# Altium footprint library PcbLib_Source_IoT.PcbLib: 49 footprints (part 3 of 4)
Each footprint in its own frame and in the unit in brackets; x right, y up, seen from the top. Pads: shape width x height; smd on the part's side, far side on the other; paste and mask are expansions set on the pad; w line width, h text height; cw(c..) or ccw(c..) is an arc to the next point about the centre after c.
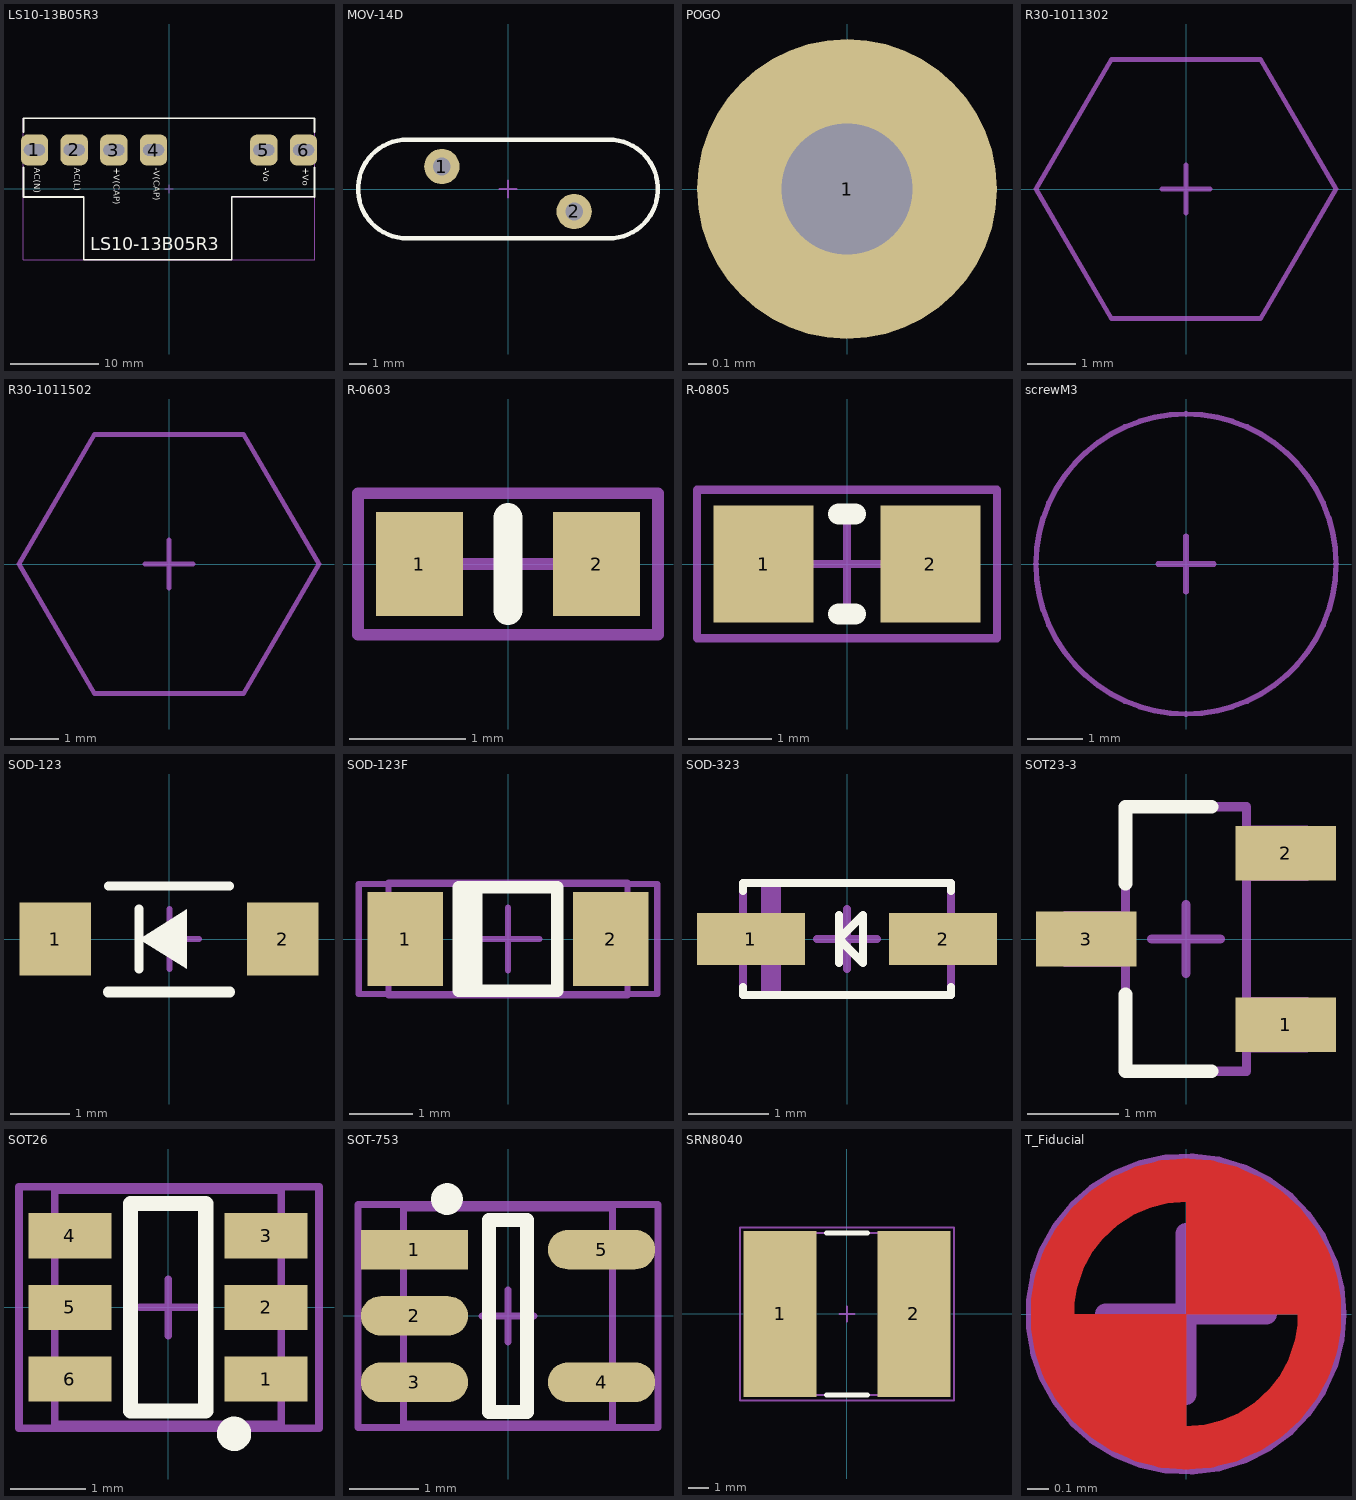
[diagram p2: the footprints below, top view; thin cyan lines are the x and y axes]

## LS10-13B05R3 [mm]
pads (6):
  rrect50% 3.1x3.5 hole 1.3 slot 2.4 at 0 deg: 1(-15.25,4.43) 2(-10.75,4.43) 3(-6.25,4.42) 4(-1.75,4.42) 5(10.75,4.42) 6(15.25,4.42)
Top Overlay:
  lines w0.2: -16.5,2.425 -16.5,-0.904 -9.662,-0.904 -9.662,-8.025 7.102,-8.025 ; -16.5,6.425 -16.5,8.025 16.5,8.025 16.5,6.425 ; 7.102,-8.007 7.102,-0.886 16.5,-0.886 ; 16.5,-0.895 16.5,2.425
  text "AC(N)" at -15.528,2.398 h1.2
  text "AC(L)" at -11.028,2.398 h1.2
  text "+V(CAP)" at -6.528,2.398 h1.2
  text "-V(CAP)" at -2.028,2.398 h1.2
  text "-Vo" at 10.372,2.398 h1.2
  text "+Vo" at 14.872,2.398 h1.2
  text "LS10-13B05R3" at -8.921,-7.473 h2.5
Mechanical:
  lines w0.1: -0.5,0 0.5,0 ; 0,-0.5 0,0.5 ; 7.102,-8.025 -9.662,-8.025 -9.662,-0.904 -16.5,-0.904 -16.5,8.025 16.5,8.025 16.5,-0.895 7.102,-0.895 7.102,-8.016
Top Assembly (Mech29):
  lines w0.1: -16.5,-8.025 16.5,-8.025 16.5,8.025 -16.5,8.025 -16.5,-8.025
  text "'.Designator'" at -11,-6.966 h2
3D body "PCB2.step": height 18.62, standoff -1.42, extent -16.081,-7.653 15.966,7.522

## MOV-14D [mm]
pads (2):
  round 2 hole 1: 1(-3.75,1.275) 2(3.75,-1.275)
Top Overlay:
  lines w0.254: -5.7,-2.8 cw(c-5.7,0) -5.7,2.8 5.7,2.8 cw(c5.7,0) 5.7,-2.8 -5.7,-2.8
Mechanical:
  lines w0.1: -0.5,0 0.5,0 ; 0,-0.5 0,0.5 ; -5.7,-2.8 cw(c-5.7,0) -5.7,2.8 5.7,2.8 cw(c5.7,0) 5.7,-2.8 -5.7,-2.8
Top Assembly (Mech29):
  lines w0.1: -5.7,-2.8 cw(c-5.7,0) -5.7,2.8 5.7,2.8 cw(c5.7,0) 5.7,-2.8 -5.7,-2.8
  text "'.Designator'" at -2.318,-0.559 h2
3D body "User Library-Varistor 14mm.step": height 20.5, standoff -2.5, extent -8.5,-2.8 8.5,2.8

## POGO [mm]
pads (1):
  round 1.6 hole 0.7: 1(0,0)
3D body "mill-max-0914-3-15-20-77-14-11-0.step": height 9.98, standoff -2.9, extent -0.914,-0.914 0.914,0.914

## R30-1011302 [mm]
Mechanical:
  lines w0.1: -0.5,0 0.5,0 ; 0,-0.5 0,0.5 ; -3.125,0 -1.55,2.7 1.55,2.7 3.125,0 1.55,-2.7 -1.55,-2.7 -3.125,0
Top Assembly (Mech29):
  lines w0.1: -3.125,0 -1.55,2.7 1.55,2.7 3.125,0 1.55,-2.7 -1.55,-2.7 -3.125,0
  text "'.Designator'" at -1.025,1.175 h1.5
3D body "r30-1011302.stp": height -1.61, standoff -14.61, extent -3.117,-2.7 3.118,2.7

## R30-1011502 [mm]
Mechanical:
  lines w0.1: -0.5,0 0.5,0 ; 0,-0.5 0,0.5 ; -3.125,0 -1.55,2.7 1.55,2.7 3.125,0 1.55,-2.7 -1.55,-2.7 -3.125,0
Top Assembly (Mech29):
  lines w0.1: -3.125,0 -1.55,2.7 1.55,2.7 3.125,0 1.55,-2.7 -1.55,-2.7 -3.125,0
  text "'.Designator'" at -1.4,-0.525 h2
3D body "r30-1011502.stp": height -1.6, standoff -16.6, extent -3.117,-2.7 3.118,2.7

## R-0603 [mm]
pads (2):
  rect 0.75x0.9 smd mask+0.1: 1(-0.765,0) 2(0.765,0)
Top Overlay:
  lines w0.254: 0,-0.4 0,0.4
Mechanical:
  lines w0.1: -0.375,0 0.375,0 ; 0,-0.375 0,0.375 ; -1.295,-0.61 -1.295,0.61 1.295,0.61 1.295,-0.61 -1.295,-0.61
Top Assembly (Mech29):
  lines w0.1: -1.295,-0.61 -1.295,0.61 1.295,0.61 1.295,-0.61 -1.295,-0.61
  text "'.Designator'" at -0.975,-0.371 h1.2
3D body "User Library-Chip Resistor_0603 (1608).step": height 0.47, standoff 0, extent -0.8,-0.401 0.8,0.401

## R-0805 [mm]
pads (2):
  rect 1.2x1.4 smd: 1(-1,0) 2(1,0)
Top Overlay:
  lines w0.254: -0.1,-0.6 0.1,-0.6 ; -0.1,0.6 0.1,0.6
Mechanical:
  lines w0.1: -0.5,0 0.5,0 ; 0,-0.5 0,0.5 ; -1.8,-0.889 -1.8,0.889 1.8,0.889 1.8,-0.889 -1.8,-0.889
Top Assembly (Mech29):
  lines w0.1: -1.8,-0.889 -1.8,0.889 1.8,0.889 1.8,-0.889 -1.8,-0.889
  text "'.Designator'" at -1.05,-0.371 h1.2
3D body "RESC-0805.stp": height 0.6, standoff 0, extent -1.05,-0.675 1.05,0.675

## screwM3 [mm]
Mechanical:
  circle w0.1: c0,0 r2.725
  lines w0.1: -0.5,0 0.5,0 ; 0,-0.5 0,0.5
Top Assembly (Mech29):
  circle w0.1: c0,0 r2.725
  text "'.Designator'" at -1.375,-1.7 h1.5
3D body "keystone-PN7689-1.STEP": height 1.72, standoff -5.95, extent -2.73,-2.73 2.731,2.731

## SOD-123 [mm] "On Semi recommended land pattern"
height 1.35
pads (2):
  rect 1.2x1.22 smd: 1(-1.905,0) 2(1.905,0)
Top Overlay:
  region: 0.3,-0.5 0.3,0.5 -0.5,0
  lines w0.152: -1.016,0.889 1.016,0.889 ; -0.5,-0.5 -0.5,0.5
  lines w0.178: -1.016,-0.889 1.016,-0.889
Mechanical:
  lines w0.1: -0.495,0 0.505,0 ; 0.005,-0.5 0.005,0.5
3D body "SOD-123.stp": height 1.35, standoff 0, extent -1.932,-0.9 1.932,0.9

## SOD-123F [mm]
pads (2):
  rect 1.2x1.5 smd: 1(-1.635,0) 2(1.635,0)
Top Overlay:
  lines w0.2: -0.655,-0.825 -0.655,0.825 ; -0.505,-0.825 -0.505,0.825 ; -0.78,-0.825 -0.78,0.825 0.78,0.825 0.78,-0.825 -0.78,-0.825
Top Assembly:
  lines w0.1: -1.9,-0.9 1.9,-0.9 1.9,0.9 -1.9,0.9 -1.9,-0.9
Mechanical:
  lines w0.1: -0.5,0 0.5,0 ; 0,-0.5 0,0.5 ; -2.375,-0.875 -2.375,0.875 2.375,0.875 2.375,-0.875 -2.375,-0.875
3D body "User Library-SOD-123F.SLDPRT": height 1.02, standoff 0, extent -1.9,-0.9 1.9,0.9

## SOD-323 [mm]
pads (2):
  rect 1.35x0.65 smd: 1(-1.2,0) 2(1.2,0)
Top Overlay:
  lines w0.1: -1.3,-0.6 -1.3,-0.7 1.3,-0.7 1.3,-0.6 ; -1.3,0.6 -1.3,0.7 1.3,0.7 1.3,0.6 ; -0.1,-0.3 -0.1,0 ; -0.1,0.3 -0.1,0 ; -0.1,0 0.2,-0.3 0.2,0.3 -0.1,0
Mechanical:
  lines w0.1: -0.375,0 0.375,0 ; 0,-0.375 0,0.375 ; -1.3,-0.7 1.3,-0.7 1.3,0.7 -1.3,0.7 -1.3,-0.7
Top Assembly (Mech29):
  rectangle: -1.075,-0.7 -0.825,0.7
  lines w0.1: -1.3,-0.7 -1.3,0.7 1.3,0.7 1.3,-0.7 -1.3,-0.7
  text "'.Designator'" at -0.675,-0.371 h1.2
3D body "User Library-SOD-323.step": height 1.1, standoff 0, extent -1.3,-0.675 1.3,0.675

## SOT23-3 [mm]
pads (3):
  rect 1.1x0.6 smd: 1(1.092,-0.94) 2(1.092,0.94) 3(-1.092,0)
Top Overlay:
  lines w0.152: -0.66,-0.61 -0.66,-1.448 0.279,-1.448 ; -0.66,0.61 -0.66,1.448 0.279,1.448
Mechanical:
  lines w0.1: -0.375,0 0.375,0 ; 0,-0.375 0,0.375 ; -1.321,-0.254 -1.321,0.254 -0.66,0.254 -0.66,-0.254 -1.321,-0.254 ; -0.66,-1.448 -0.66,1.448 0.66,1.448 0.66,-1.448 -0.66,-1.448 ; 0.66,-1.194 0.66,-0.686 1.321,-0.686 1.321,-1.194 0.66,-1.194 ; 0.66,0.686 0.66,1.194 1.321,1.194 1.321,0.686 0.66,0.686
Top Assembly (Mech29):
  lines w0.1: -1.321,-0.254 -0.66,-0.254 -0.66,0.254 -1.321,0.254 -1.321,-0.254 ; -0.66,-1.448 0.66,-1.448 0.66,1.448 -0.66,1.448 -0.66,-1.448 ; 0.66,-1.194 1.321,-1.194 1.321,-0.686 0.66,-0.686 0.66,-1.194 ; 0.66,0.686 1.321,0.686 1.321,1.194 0.66,1.194 0.66,0.686
  text "'.Designator'" at 0.35,-0.925 h1.2
3D body "LM3480IM3-12.STEP": height 1.12, standoff 0, extent -1.185,-1.46 1.185,1.46

## SOT26 [mm]
pads (6):
  rect 1.1x0.6 smd: 1(1.3,-0.95) 2(1.3,0) 3(1.3,0.95) 4(-1.3,0.95) 5(-1.3,0) 6(-1.3,-0.95)
Top Overlay:
  circle w0.254: c0.875,-1.675 r0.1
  lines w0.2: -0.5,-1.375 -0.5,1.375 0.5,1.375 0.5,-1.375 -0.5,-1.375
Mechanical:
  lines w0.1: -0.375,0 0.375,0 ; 0,-0.375 0,0.375 ; -1.975,-1.6 2,-1.6 2,1.6 -1.975,1.6 -1.975,-1.6
Top Assembly (Mech29):
  lines w0.1: -1.5,-1.55 -1.5,1.55 1.5,1.55 1.5,-1.55 -1.5,-1.55
  text "'.Designator'" at 0.35,-0.85 h1.2
3D body "SOT26_DIO.step": height 1.4, standoff 0, extent -1.499,-1.549 1.499,1.549

## SOT-753 [mm]
pads (5):
  rect 1.54x0.566 smd: 1(-1.341,0.95)
  rrect100% 1.54x0.566 smd: 2(-1.341,0) 3(-1.341,-0.95) 4(1.341,-0.95) 5(1.341,0.95)
Top Overlay:
  circle w0.254: c-0.875,1.675 r0.1
  lines w0.2: -0.275,-1.375 0.275,-1.375 0.275,1.375 -0.275,1.375 -0.275,-1.375
Top Assembly:
  lines w0.1: -1.5,-1.55 -1.5,1.55 1.5,1.55 1.5,-1.55 -1.5,-1.55
  text "'.Designator'" at -0.35,0.85 h1.2
Mechanical:
  lines w0.1: -0.375,0 0.375,0 ; 0,-0.375 0,0.375 ; -2.15,-1.6 -2.15,1.6 2.15,1.6 2.15,-1.6 -2.15,-1.6
3D body "User Library-SOT-23-5.STEP": height 1.46, standoff 0, extent -1.5,-1.475 1.5,1.525

## SRN8040 [mm]
pads (2):
  rect 3.6x8.2 smd: 1(-3.3,0) 2(3.3,0)
Top Overlay:
  lines w0.254: -1,-4 1,-4 ; -1,4 1,4
Mechanical:
  lines w0.1: -0.375,0 0.375,0 ; 0,-0.375 0,0.375 ; -5.275,-4.275 -5.275,4.275 5.275,4.275 5.275,-4.275 -5.275,-4.275
Top Assembly (Mech29):
  lines w0.1: -4.025,-4 -4.025,4 4.025,4 4.025,-4 -4.025,-4
  text "'.Designator'" at -1.425,-0.55 h2
3D body "User Library-Inductor SRN8040 Series.step": height -1.8, standoff -5.8, extent -4.009,-4 4.009,4

## T_Fiducial [mm] "Fiducial"
Top Layer:
  region: 0,0 0,0.625 0.124,0.625 0.354,0.53 0.53,0.354 0.625,0.124 0.625,0
  region: 0,0 0,-0.625 -0.124,-0.625 -0.354,-0.53 -0.53,-0.354 -0.625,-0.124 -0.625,0
  lines w0.203: 0,-0.625 cw(c0,0) 0,0.625 cw(c0,0) 0,-0.625
Top Solder:
  circle w0.203: c0,0 r0.625
  region: 0,-0.625 -0.124,-0.625 -0.354,-0.53 -0.53,-0.354 -0.625,-0.124 -0.625,0 -0.625,0.124 -0.53,0.354 -0.354,0.53 -0.124,0.625 0,0.625 0.124,0.625 0.354,0.53 0.53,0.354 0.625,0.124 0.625,0 0.625,-0.124 0.53,-0.354 0.354,-0.53 0.124,-0.625
Mechanical:
  circle w0.1: c0,0 r0.7
  lines w0.1: -0.375,0 0.375,0 ; 0,-0.375 0,0.375